# Altium footprint library PcbLib.PcbLib: 162 footprints (part 10 of 11)
Each footprint in its own frame and in the unit in brackets; x right, y up, seen from the top. Pads: shape width x height; smd on the part's side, far side on the other; paste and mask are expansions set on the pad; w line width, h text height; cw(c..) or ccw(c..) is an arc to the next point about the centre after c.
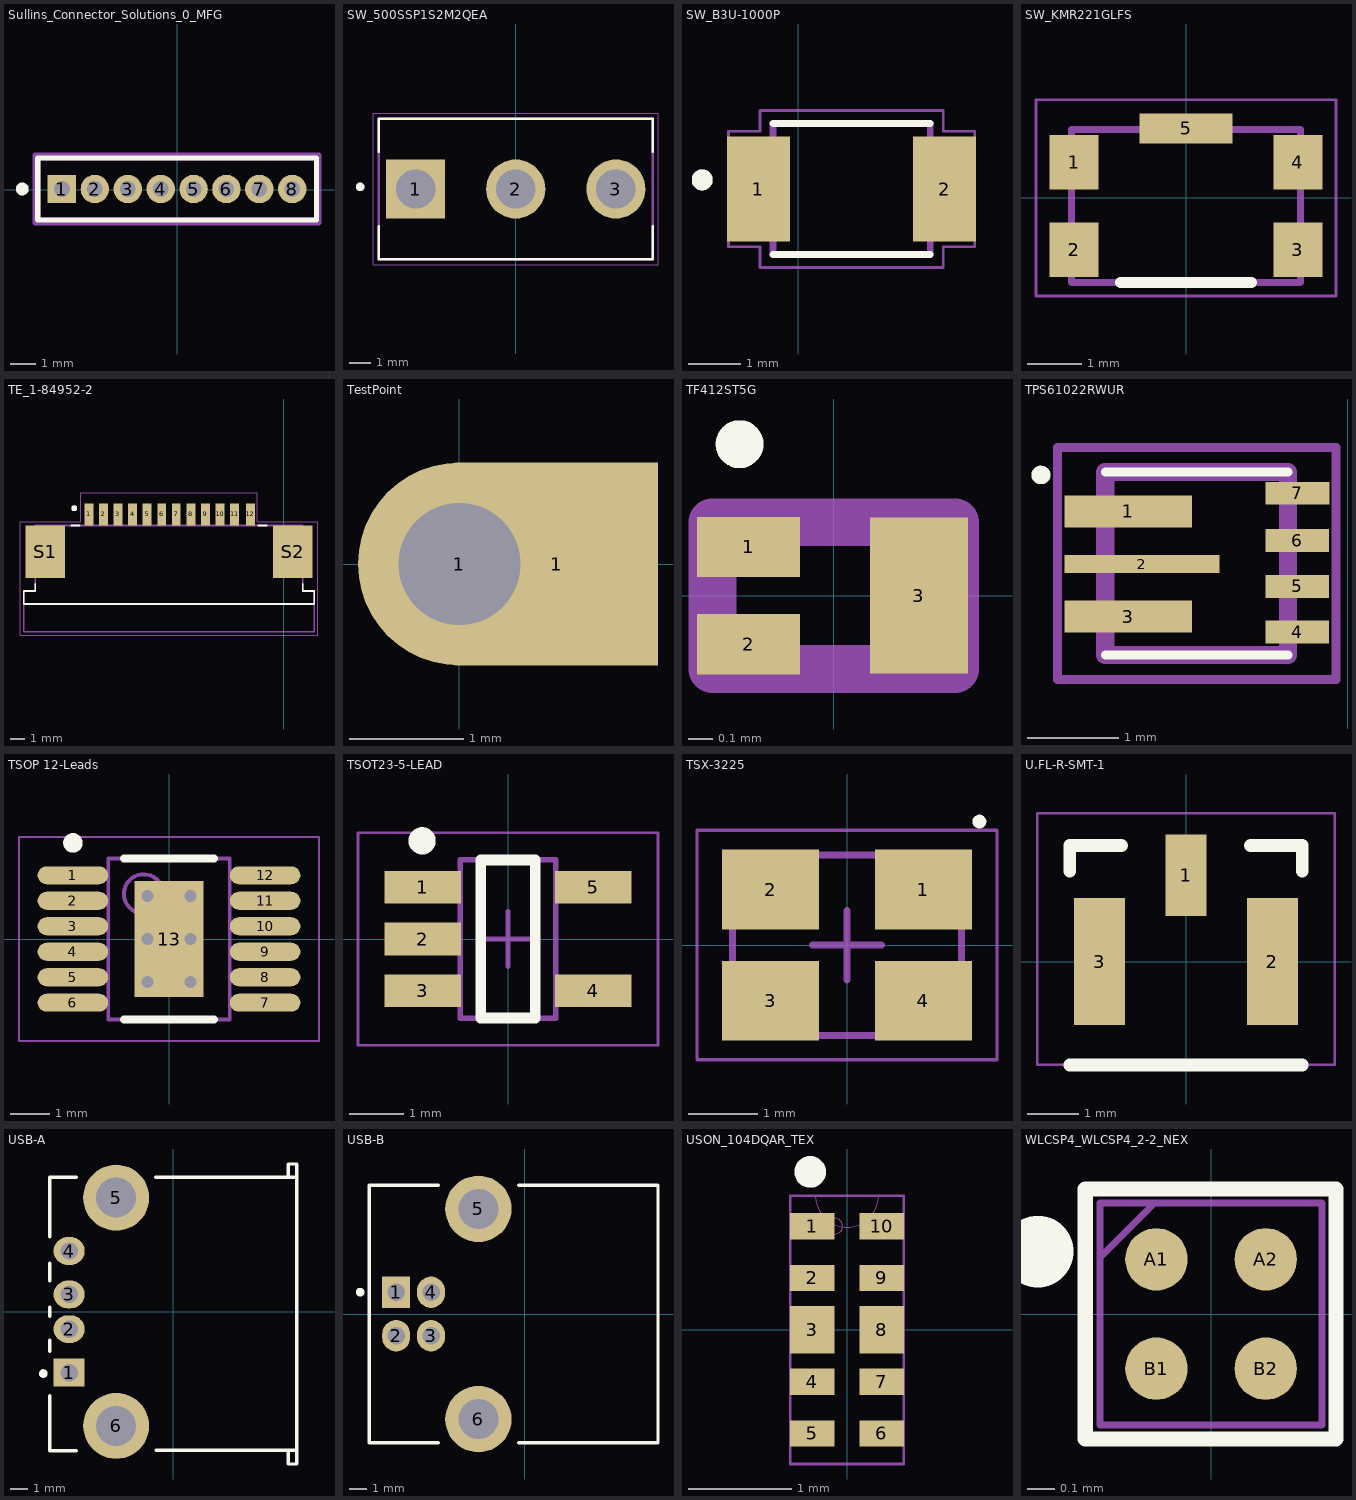
[diagram p9: the footprints below, top view; thin cyan lines are the x and y axes]

## Sullins_Connector_Solutions_0_MFG [mm]
pads (8):
  rect 1.1x1.1 hole 0.6 paste-1000 mask+0: 1(-4.445,0.025)
  round 1.1 hole 0.6 paste-1000 mask+0: 2(-3.175,0.025) 3(-1.905,0.025) 4(-0.635,0.025) 5(0.635,0.025) 6(1.905,0.025) 7(3.175,0.025) 8(4.445,0.025)
Top Overlay:
  circle w0.25: c-5.98,0.025 r0.125
  lines w0.2: -5.38,-1.175 5.38,-1.175 5.38,1.225 -5.38,1.225 -5.38,-1.175
Mechanical 10:
  lines w0.2: -5.48,-1.275 5.48,-1.275 5.48,1.325 -5.48,1.325 -5.48,-1.275
Mechanical 12:
  lines w0.2: -5.38,-1.175 5.38,-1.175 5.38,1.225 -5.38,1.225 -5.38,-1.175
Mechanical 15:
  lines w0.2: -5.48,-1.275 5.48,-1.275 5.48,1.325 -5.48,1.325 -5.48,-1.275
3D body "Conn_Sullins_Connector_Solutions_LPPB081NFFN-RC_eec.STEP": height 0.25, standoff 0, extent -5.48,-1.275 5.48,1.325

## SW_500SSP1S2M2QEA [mm]
pads (3):
  rect 2.775x2.775 hole 1.85: 1(-4.7,-18.669)
  round 2.775 hole 1.85: 2(0,-18.669) 3(4.7,-18.669)
Top Overlay:
  circle w0.2: c-7.3,-18.569 r0.1
  lines w0.127: -6.425,-20.419 -6.425,-21.969 6.425,-21.969 6.425,-20.419 ; -6.425,-16.919 -6.425,-15.369 6.425,-15.369 6.425,-16.919
Mechanical 13:
  circle w0.2: c-7.3,-18.569 r0.1
  lines w0.127: -6.425,-21.969 6.425,-21.969 6.425,-15.369 -6.425,-15.369 -6.425,-21.969
Mechanical 15:
  lines w0.05: -6.675,-22.219 6.675,-22.219 6.675,-15.119 -6.675,-15.119 -6.675,-22.219
3D body "500SSP1S2M2QEA--3DModel-STEP-56544 (1).STEP": height 13.6, standoff -6.59, extent -6.425,-21.942 6.425,-15.342

## SW_B3U-1000P [mm]
pads (2):
  rect 1.2x2 smd: 1(-0.762,-9.779) 2(2.794,-9.779)
Top Overlay:
  circle w0.2: c-1.836,-9.604 r0.1
  lines w0.127: -0.484,-11.029 2.516,-11.029 ; -0.484,-8.529 2.516,-8.529
Mechanical 13:
  circle w0.2: c-1.836,-9.604 r0.1
  lines w0.127: -0.484,-11.029 2.516,-11.029 2.516,-8.529 -0.484,-8.529 -0.484,-11.029
Mechanical 15:
  lines w0.05: -1.334,-10.879 -1.334,-8.679 -0.734,-8.679 -0.734,-8.279 2.766,-8.279 2.766,-8.679 3.366,-8.679 3.366,-10.879 2.766,-10.879 2.766,-11.279 -0.734,-11.279 -0.734,-10.879 -1.334,-10.879
3D body "B3U-1000P--3DModel-STEP-56544.STEP": height 1.76, standoff 0.01, extent -0.984,-11.029 3.016,-8.529

## SW_KMR221GLFS [mm]
pads (5):
  rect 0.9x1 smd: 1(-2.059,0.645) 2(-2.059,-0.955) 3(2.041,-0.955) 4(2.041,0.645)
  rect 1.7x0.55 smd: 5(-0.009,1.27)
Top Overlay:
  lines w0.2: -1.209,-1.555 1.191,-1.555
Mechanical 13:
  lines w0.127: -2.109,-1.555 2.091,-1.555 2.091,1.245 -2.109,1.245 -2.109,-1.555
Mechanical 15:
  lines w0.05: -2.759,-1.805 2.741,-1.805 2.741,1.795 -2.759,1.795 -2.759,-1.805
3D body "KMR221GLFS--3DModel-STEP-56544.STEP": height 1.91, standoff 0.01, extent -2.3,-1.55 2.3,1.25

## TE_1-84952-2 [mm]
pads (14):
  rect 0.61x1.5 smd: 1(-13.374,-15.24) 2(-12.374,-15.24) 3(-11.374,-15.24) 4(-10.374,-15.24) 5(-9.374,-15.24) 6(-8.374,-15.24) 7(-7.374,-15.24) 8(-6.374,-15.24) 9(-5.374,-15.24) 10(-4.374,-15.24) 11(-3.374,-15.24) 12(-2.286,-15.24)
  rect 2.68x3.6 smd: S1(-16.364,-17.786) S2(0.616,-17.786)
Top Overlay:
  circle w0.2: c-14.374,-14.816 r0.1
  lines w0.127: -17.049,-19.986 -17.049,-20.496 -17.834,-20.496 -17.834,-21.386 2.086,-21.386 2.086,-20.496 1.301,-20.496 1.301,-19.986 ; -14.574,-15.986 -14.014,-15.986 ; -1.734,-15.986 -1.174,-15.986
Mechanical 13:
  circle w0.2: c-14.374,-14.816 r0.1
  lines w0.127: -17.834,-21.386 -17.834,-23.286 2.086,-23.286 2.086,-21.386 ; -17.834,-21.386 2.086,-21.386 ; -17.834,-21.386 -17.834,-20.496 -17.049,-20.496 -17.049,-15.986 1.301,-15.986 1.301,-20.496 2.086,-20.496 2.086,-21.386
Mechanical 15:
  lines w0.05: -18.084,-23.536 2.336,-23.536 2.336,-15.736 -1.819,-15.736 -1.819,-13.736 -13.929,-13.736 -13.929,-15.736 -18.084,-15.736 -18.084,-23.536
3D body "1-84952-2.stp": height 2.5, standoff -0.06, extent -17.834,-21.401 2.086,-14.861

## TestPoint [mil] "Testpont for Wired Connection"
pads (2):
  round 70 hole 42: 1(0,0)
  rect 70x70 smd: 1(33.46,0)

## TF412ST5G [mil]
pads (3):
  rect 16.93x9.87 smd mask+2: 1(-14,8) 2(-14,-8)
  rect 16.14x25.65 smd: 3(14,0)
Top Overlay:
  lines w3.94: -17.43,24.87 ccw(c-15.46,24.87) -13.5,24.87 ccw(c-15.46,24.87) -17.43,24.87
Mechanical 13:
  lines w7.87: -19.92,-12.05 19.92,-12.05 19.92,12.05 -19.92,12.05 -19.92,-12.05
3D body "TF412ST5G.stp": height 21.26, standoff 0, extent -21.06,-12.05 19.92,12.05

## TPS61022RWUR [mm]
pads (7):
  rect 1.4x0.35 smd: 1(-2.4,-5.4) 3(-2.4,-6.55)
  rect 1.7x0.2 smd: 2(-2.25,-5.975)
  rect 0.7x0.25 smd: 4(-0.551,-6.719) 5(-0.551,-6.219) 6(-0.551,-5.719) 7(-0.55,-5.2)
Top Overlay:
  lines w0.1: -2.651,-6.969 -0.651,-6.969 ; -2.651,-4.969 -0.651,-4.969 ; -3.35,-5.05 cw(c-3.359,-5) -3.35,-4.95 cw(c-3.35,-5) -3.35,-5.05
Mechanical 13:
  lines w0.2: -2.651,-6.969 -0.651,-6.969 -0.651,-4.969 -2.651,-4.969 -2.651,-6.969
Mechanical 15:
  lines w0.1: -3.175,-7.239 -0.127,-7.239 -0.127,-4.699 -3.175,-4.699 -3.175,-7.239
3D body "TPS61022RWUR.stp": height 1.1, standoff 0, extent -2.831,-6.969 -0.476,-4.969

## TSOP 12-Leads [mm] "TSOP, 12-Leads, Body 4.04x3.00mm, Pitch 0.65mm, Thermal Pad 2.95x1.76mm, IPC Low Density"
height 1.1
pads (13):
  oval 1.8x0.46 smd: 1(-2.45,1.625) 2(-2.45,0.975) 3(-2.45,0.325) 4(-2.45,-0.325) 5(-2.45,-0.975) 6(-2.45,-1.625) 7(2.45,-1.625) 8(2.45,-0.975) 9(2.45,-0.325) 10(2.45,0.325) 11(2.45,0.975) 12(2.45,1.625)
  rect 1.76x2.95 smd: 13(0,0)
via -0.55,1.1 diameter 0.58 hole 0.305
via 0.55,1.1 diameter 0.58 hole 0.305
via -0.55,0 diameter 0.58 hole 0.305
via 0.55,0 diameter 0.58 hole 0.305
via -0.55,-1.1 diameter 0.58 hole 0.305
via 0.55,-1.1 diameter 0.58 hole 0.305
Top Overlay:
  circle w0.25: c-2.45,2.45 r0.125
  lines w0.2: -1.15,-2.05 1.15,-2.05 ; -1.15,2.05 1.15,2.05
Mechanical 13:
  circle w0.1: c-0.65,1.15 r0.5
  lines w0.1: -1.55,-2.05 -1.55,2.05 1.55,2.05 1.55,-2.05 -1.55,-2.05
Mechanical 15:
  lines w0.05: -3.825,-2.6 -3.825,2.6 3.825,2.6 3.825,-2.6 -3.825,-2.6
  lines w0.1: -0.5,0 0.5,0 ; 0,-0.5 0,0.5
3D body "TSOP 12-Leads.step": height 1.1, standoff 0, extent -2.567,-2.05 2.567,2.05

## TSOT23-5-LEAD [mm] "SOT23, 5-Leads, Body 2.90x3.10mm, Pitch 0.95mm"
height 1
pads (5):
  rect 1.4x0.6 smd: 1(-1.56,0.95) 2(-1.56,0) 3(-1.56,-0.95) 4(1.56,-0.95) 5(1.56,0.95)
Top Overlay:
  circle w0.25: c-1.575,1.8 r0.125
  lines w0.2: -0.5,-1.45 -0.5,1.45 0.5,1.45 0.5,-1.45 -0.5,-1.45
Mechanical 13:
  lines w0.1: -0.875,-1.45 0.875,-1.45 0.875,1.45 -0.875,1.45 -0.875,-1.45
Mechanical 15:
  lines w0.05: -2.75,-1.95 2.75,-1.95 2.75,1.95 -2.75,1.95 -2.75,-1.95
  lines w0.1: -0.5,0 0.5,0 ; 0,-0.5 0,0.5
3D body "User Library-SOT23-5-2.STEP": height 1.45, standoff 0, extent -1.403,-1.45 1.397,1.45

## TSX-3225 [mm] "DFN, 4-Leads, Body 2.50x3.20mm, Pitch 2.00mm, IPC Low Density"
height 0.7
pads (4):
  rect 1.4x1.15 smd: 1(1.1,0.8) 2(-1.1,0.8) 3(-1.1,-0.8) 4(1.1,-0.8)
Top Overlay:
  circle w0.1: c1.905,1.778 r0.05
Mechanical 13:
  lines w0.1: -1.65,-1.3 -1.65,1.3 1.65,1.3 1.65,-1.3 -1.65,-1.3
Mechanical 15:
  lines w0.05: -2.159,-1.651 -2.159,1.651 2.159,1.651 2.159,-1.651 -2.159,-1.651
  lines w0.1: -0.5,0 0.5,0 ; 0,-0.5 0,0.5
3D body "User Library-tsx-3225-1.STEP": height 0.6, standoff 0, extent -1.6,-1.23 1.6,1.27

## U.FL-R-SMT-1 [mm] "Onboard UFL Jack"
height 2
pads (3):
  rect 0.8x1.6 smd: 1(0,1.7)
  rect 1x2.5 smd: 2(1.7,0) 3(-1.7,0)
Top Overlay:
  lines w0.254: -2.286,-2.032 2.286,-2.032 ; -2.286,1.778 -2.286,2.286 -1.27,2.286 ; 1.27,2.286 2.286,2.286 2.286,1.778
Mechanical 15:
  lines w0.05: -2.921,-2.032 -2.921,2.921 2.921,2.921 2.921,-2.032 -2.921,-2.032
3D body "SW3dPS-U.FL-R-SMT-1.STEP": height 1.25, standoff -0.01, extent -1.5,-1.55 1.5,1.55

## USB-A [mm] "USB Type A (USB Host) Jack"
height 6.8
pads (6):
  rect 1.8x1.6 hole 1: 1(-6.005,-3.5)
  oval 1.8x1.6 hole 1: 2(-6.005,-1) 3(-6.005,1) 4(-6.005,3.5)
  round 3.8 hole 2.3: 5(-3.295,6.57) 6(-3.295,-6.57)
Top Overlay:
  circle w0.25: c-7.493,-3.556 r0.125
  lines w0.2: -7.112,-4.826 -7.112,-8.001 -5.595,-8.001 ; -7.112,-2.286 -7.112,-1.651 ; -7.112,-0.254 -7.112,0.254 ; -7.112,1.778 -7.112,2.794 ; -7.112,4.318 -7.112,7.747 -5.595,7.747 ; -1.016,7.747 7.091,7.747 ; -0.995,-7.962 7.112,-7.962 ; 6.604,-7.962 6.604,-8.763 7.112,-8.763 7.112,8.509 6.604,8.509 6.604,7.747
3D body "usb_a-usbsa.stp": height 7, standoff -4.5, extent -7.088,-7.927 7.112,7.673

## USB-B [mm] "USB Type B (USB Device) Jack"
height 10.85
pads (6):
  rect 1.6x1.8 hole 1: 1(-7.35,1.25)
  oval 1.6x1.8 hole 1: 2(-7.35,-1.25) 3(-5.35,-1.25) 4(-5.35,1.25)
  round 3.8 hole 2.3: 5(-2.64,6.02) 6(-2.64,-6.02)
Top Overlay:
  circle w0.25: c-9.41,1.25 r0.125
  lines w0.2: -4.94,-7.366 -8.89,-7.366 -8.89,7.366 -4.94,7.366 ; -0.34,-7.366 7.64,-7.366 7.64,7.366 -0.34,7.366
3D body "usb_a-usbsb.stp": height 10.78, standoff -3.22, extent -8.89,-7.299 7.61,7.299

## USON_104DQAR_TEX [mil]
pads (10):
  rect 17x10 smd paste-5 mask+1.5: 1(-13.19,39.38) 2(-13.19,19.69) 4(-13.19,-19.69) 5(-13.19,-39.38) 6(13.19,-39.38) 7(13.19,-19.69) 9(13.19,19.69) 10(13.19,39.38)
  rect 17x18 smd paste+0 mask+1.5: 3(-13.19,0) 8(13.19,0)
Top Overlay:
  lines w6: -11.06,60.61 ccw(c-14,60) -11,59.85
Mechanical 13:
  circle w0: c-4.69,39.38 r3
  lines w0: -12,51 ccw(c0,51) 12,51
  lines w1: -21.5,-51 -21.5,51 21.5,51 21.5,-51 -21.5,-51
3D body "USON_104DQAR_TEX.step": height 22.09, standoff 0, extent -21.5,-50.98 21.5,50.98

## WLCSP4_WLCSP4_2-2_NEX [mm]
pads (4):
  round 0.229 smd paste+0 mask+0.051: A1(-0.2,0.2) A2(0.2,0.2) B1(-0.2,-0.2) B2(0.2,-0.2)
Top Overlay:
  circle w0.25: c-0.635,0.229 r0.006
  lines w0.056: -0.46,-0.457 -0.46,0.457 ; -0.457,-0.457 0.451,-0.457 ; -0.454,0.457 0.454,0.457 ; 0.457,-0.457 0.457,0.457
Mechanical 13:
  lines w0.025: -0.406,0.206 -0.206,0.406 ; -0.406,-0.406 0.406,-0.406 0.406,0.406 -0.406,0.406 -0.406,-0.406
3D body "WLCSP4_WLCSP4_2-2_NEX.step": height 0.38, standoff 0, extent -0.406,-0.406 0.406,0.406